# Altium footprint library SamacSys.PcbLib: 1008 footprints (part 7 of 63)
Each footprint in its own frame and in the unit in brackets; x right, y up, seen from the top. Pads: shape width x height; smd on the part's side, far side on the other; paste and mask are expansions set on the pad; w line width, h text height; cw(c..) or ccw(c..) is an arc to the next point about the centre after c.
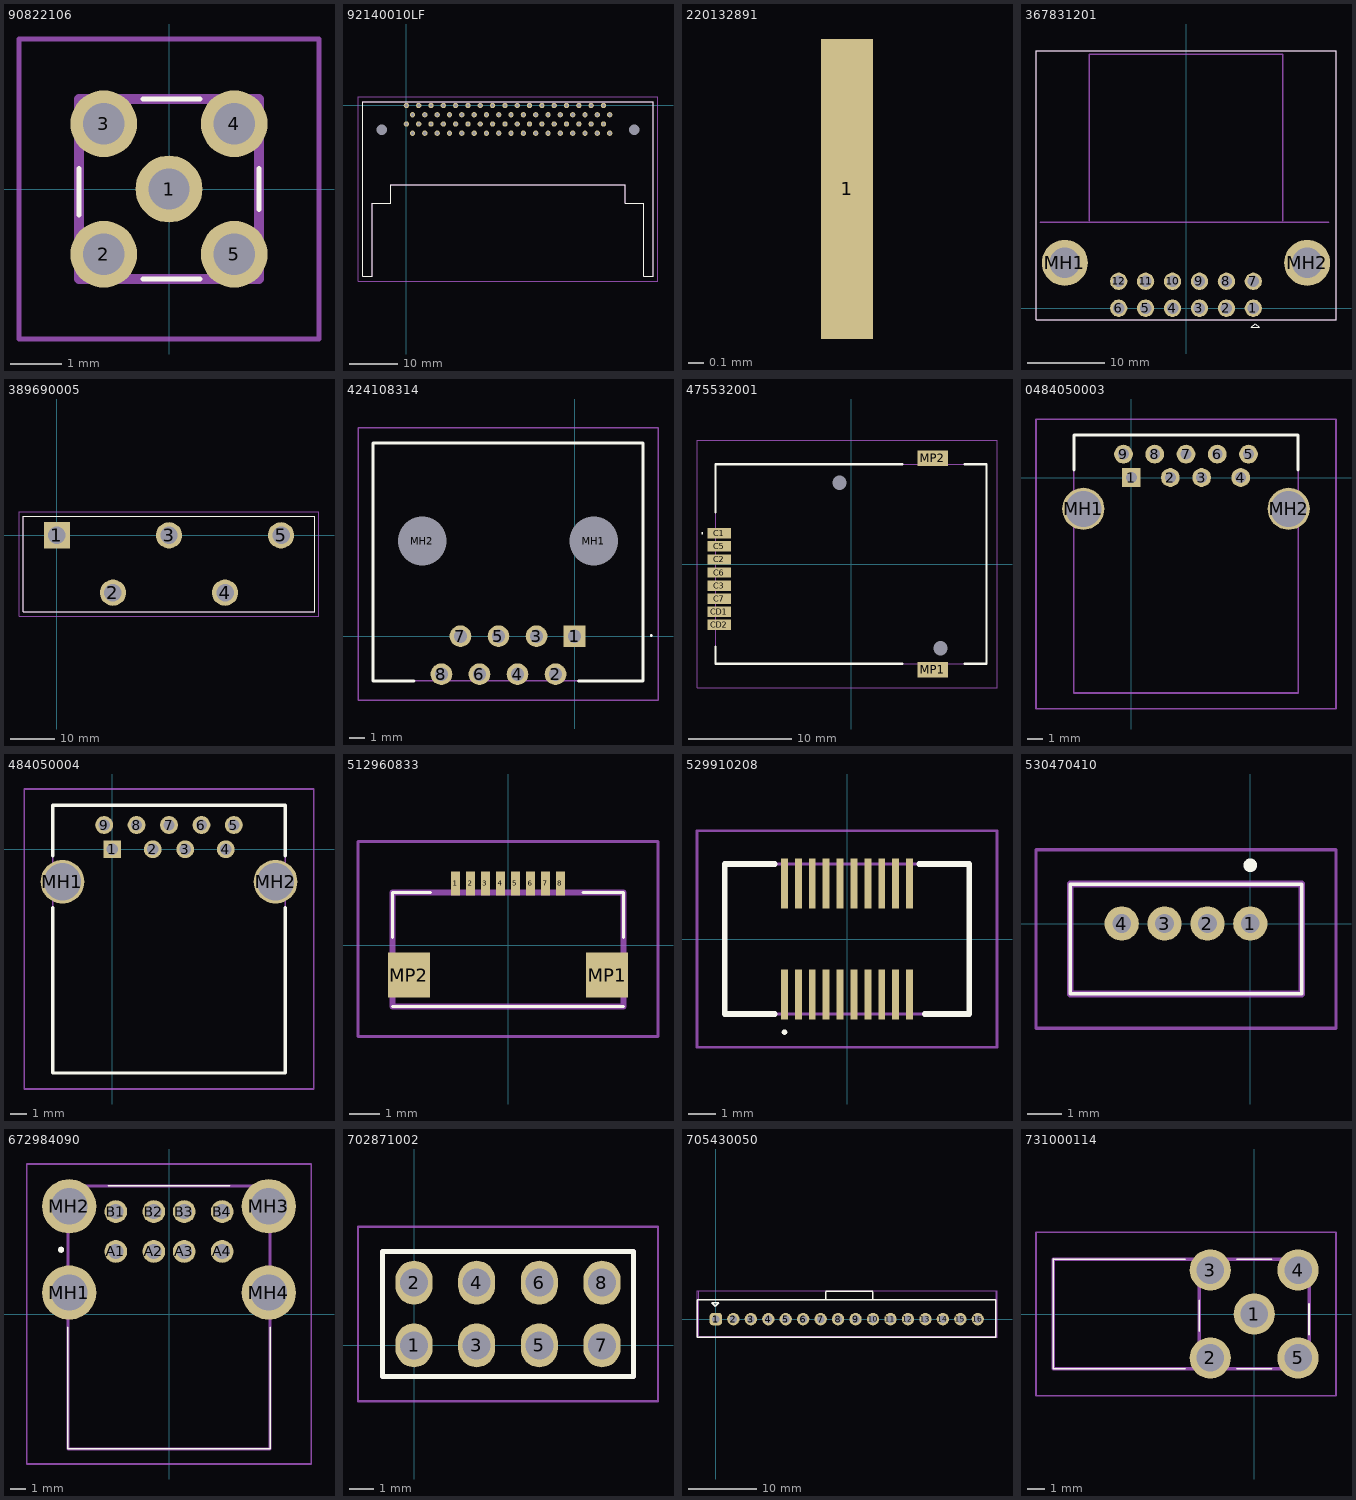
[diagram p6: the footprints below, top view; thin cyan lines are the x and y axes]

## 90822106 [mm]
pads (5):
  round 1.3 hole 0.8: 1(0,0) 2(-1.27,-1.27) 3(-1.27,1.27) 4(1.27,1.27) 5(1.27,-1.27)
Top Overlay:
  lines w0.1: -1.75,-0.5 -1.75,0.4 ; -0.5,-1.75 0.6,-1.75 ; -0.5,1.75 0.6,1.75 ; 1.75,-0.4 1.75,0.4
Assembly:
  lines w0.2: -1.75,-1.75 1.75,-1.75 1.75,1.75 -1.75,1.75 -1.75,-1.75
Countryard:
  lines w0.1: -2.92,-2.92 2.92,-2.92 2.92,2.92 -2.92,2.92 -2.92,-2.92
3D body "908-22106.stp": height 3.45, standoff -4, extent -1.75,-1.75 1.75,1.75

## 92140010LF [mm]
pads (70):
  round 1.1 hole 0.67: 1(0,0) 2(1.27,-1.906) 3(2.54,0) 4(3.81,-1.906) 5(5.08,0) 6(6.35,-1.906) 7(7.62,0) 8(8.89,-1.906) 9(10.16,0) 10(11.43,-1.906) 11(12.7,0) 12(13.97,-1.906) 13(15.24,0) 14(16.51,-1.906) 15(17.78,0) 16(19.05,-1.906) 17(20.32,0) 18(21.59,-1.906) 19(22.86,0) 20(24.13,-1.906) 21(25.4,0) 22(26.67,-1.906) 23(27.94,0) 24(29.21,-1.906) 25(30.48,0) 26(31.75,-1.906) 27(33.02,0) 28(34.29,-1.906) 29(35.56,0) 30(36.83,-1.906) 31(38.1,0) 32(39.37,-1.906) 33(40.64,0) 34(41.91,-1.906) 35(0,-3.81) 36(1.27,-5.715) 37(2.54,-3.81) 38(3.81,-5.715) 39(5.08,-3.81) 40(6.35,-5.715) 41(7.62,-3.81) 42(8.89,-5.715) 43(10.16,-3.81) 44(11.43,-5.715) 45(12.7,-3.81) 46(13.97,-5.715) 47(15.24,-3.81) 48(16.51,-5.715) 49(17.78,-3.81) 50(19.05,-5.715) 51(20.32,-3.81) 52(21.59,-5.715) 53(22.86,-3.81) 54(24.13,-5.715) 55(25.4,-3.81) 56(26.67,-5.715) 57(27.94,-3.81) 58(29.21,-5.715) 59(30.48,-3.81) 60(31.75,-5.715) 61(33.02,-3.81) 62(34.29,-5.715) 63(35.56,-3.81) 64(36.83,-5.715) 65(38.1,-3.81) 66(39.37,-5.715) 67(40.64,-3.81) 68(41.91,-5.715)
  round 1.1 hole 2.2 unplated: MH1(46.99,-5.015) MH2(-5.08,-5.015)
Top Overlay:
  lines w0.1: -8.97,-35.215 -6.985,-35.215 -6.985,-20.17 -3.175,-20.17 -3.175,-16.36 45.085,-16.36 45.085,-20.17 48.895,-20.17 48.895,-35.215 50.88,-35.215 50.88,0.785 -8.97,0.785 -8.97,-35.215
Assembly:
  lines w0.2: -8.97,-35.215 -6.985,-35.215 -6.985,-20.17 -3.175,-20.17 -3.175,-16.36 45.085,-16.36 45.085,-20.17 48.895,-20.17 48.895,-35.215 50.88,-35.215 50.88,0.785 -8.97,0.785 -8.97,-35.215
Countryard:
  lines w0.1: -9.97,-36.215 51.88,-36.215 51.88,1.785 -9.97,1.785 -9.97,-36.215
3D body "92140-010LF.stp": height 9.14, standoff -3.46, extent -9.14,-35.32 51.06,0.895

## 220132891 [mm]
pads (1):
  rect 0.35x2 smd: 1(-31.65,-12.35)

## 367831201 [mm]
pads (14):
  round 2.25 hole 1.5: 1(8.75,0) 2(5.25,0) 3(1.75,0) 4(-1.75,0) 5(-5.25,0) 6(-8.75,0) 7(8.75,3.5) 8(5.25,3.5) 9(1.75,3.5) 10(-1.75,3.5) 11(-5.25,3.5) 12(-8.75,3.5)
  round 6 hole 4: MH1(-15.75,5.9) MH2(15.75,5.9)
Top Overlay:
  lines w0.1: -19.5,-1.5 -19.5,33.5 19.5,33.5 19.5,-1.5 -19.5,-1.5 ; 8.5,-2.5 9.5,-2.5 9,-2 8.5,-2.5
Assembly:
  lines w0.2: -18.925,11.2 18.575,11.2 ; -12.6,11.4 -12.6,33 12.6,33 12.6,11.4
Countryard:
  lines w0.1: -19.5,-1.5 -19.5,33.5 19.5,33.5 19.5,-1.5 -19.5,-1.5
3D body "36783-1201.stp": height 24.58, standoff -3.04, extent -18.714,-0.294 18.644,32.163

## 389690005 [mm]
pads (5):
  rect 5.94x5.94 hole 3.96: 1(0,0)
  round 5.94 hole 3.96: 2(12.7,-13) 3(25.4,0) 4(38.1,-13) 5(50.8,0)
Top Overlay:
  lines w0.2: -7.6,-17.3 58.4,-17.3 58.4,4.3 -7.6,4.3 -7.6,-17.3
Assembly:
  lines w0.1: -7.6,-17.3 58.4,-17.3 58.4,4.3 -7.6,4.3 -7.6,-17.3
Countryard:
  lines w0.1: -8.6,-18.3 59.4,-18.3 59.4,5.3 -8.6,5.3 -8.6,-18.3
3D body "38969-0005.stp": height 22.58, standoff -4.09, extent -7.71,-18.72 58.33,2.87

## 424108314 [mm]
pads (10):
  rect 1.446x1.446 hole 0.89: 1(0,0)
  round 1.446 hole 0.89: 2(-1.27,-2.54) 3(-2.54,0) 4(-3.81,-2.54) 5(-5.08,0) 6(-6.35,-2.54) 7(-7.62,0) 8(-8.89,-2.54)
  round 1.625 hole 3.25 unplated: MH1(1.27,6.35) MH2(-10.16,6.35)
Top Overlay:
  lines w0.1: 5.07,0.05 ccw(c5.12,0.05) 5.17,0.05 ccw(c5.12,0.05) 5.07,0.05
  lines w0.2: -10.73,-2.98 -13.46,-2.98 -13.46,12.9 4.57,12.9 4.57,-2.98 0.27,-2.98
Assembly:
  lines w0.1: -13.46,-2.98 -13.46,12.9 4.57,12.9 4.57,-2.98 -13.46,-2.98
Countryard:
  lines w0.1: -14.46,-4.263 -14.46,13.9 5.57,13.9 5.57,-4.263 -14.46,-4.263
3D body "42410-8314.stp": height 16.26, standoff -3.37, extent -12.247,-2.937 3.247,12.937

## 475532001 [mm]
pads (12):
  rect 2.3x1 smd: C1(-12.8,2.985) C2(-12.8,0.445) C3(-12.8,-2.095) C5(-12.8,1.715) C6(-12.8,-0.825) C7(-12.8,-3.365) CD1(-12.8,-4.635) CD2(-12.8,-5.905)
  round 0.7 hole 1.4 unplated: MH1(8.67,-8.165) MH2(-1.13,7.885)
  rect 2.95x1.5 smd: MP1(7.9,-10.275) MP2(7.9,10.275)
Top Overlay:
  lines w0.1: -14.5,2.985 ccw(c-14.45,2.985) -14.4,2.985 ccw(c-14.45,2.985) -14.5,2.985
  lines w0.2: -13.15,-8 -13.15,-9.675 5,-9.675 ; -13.15,5 -13.15,9.675 5,9.675 ; 11,-9.675 13.15,-9.675 13.15,9.675 11,9.675
Assembly:
  lines w0.1: -13.15,-9.675 -13.15,9.675 13.15,9.675 13.15,-9.675 -13.15,-9.675
Countryard:
  lines w0.1: -14.95,-12.025 -14.95,12.025 14.15,12.025 14.15,-12.025 -14.95,-12.025
3D body "47553-2001.stp": height 1.9, standoff -0.6, extent -13.358,-10.388 13.142,10.562

## 0484050003 [mm]
pads (11):
  rect 1.2x1.2 hole 0.7: 1(0,0)
  round 1.2 hole 0.7: 2(2.5,0) 3(4.5,0) 4(7,0) 5(7.5,1.5) 6(5.5,1.5) 7(3.5,1.5) 8(1.5,1.5) 9(-0.5,1.5)
  round 2.7 hole 2.3: MH1(-3.07,-2) MH2(10.07,-2)
Top Overlay:
  lines w0.2: -3.675,0.5 -3.675,2.72 10.675,2.72 10.675,0.5
Assembly:
  lines w0.1: -3.675,-13.78 -3.675,2.72 10.675,2.72 10.675,-13.78 -3.675,-13.78
Countryard:
  lines w0.1: -6.095,-14.78 -6.095,3.72 13.095,3.72 13.095,-14.78 -6.095,-14.78
3D body "484050003.stp": height 7.57, standoff -4.04, extent -4.3,-13.8 11.3,2.7

## 484050004 [mm]
pads (11):
  rect 1.1x1.1 hole 0.7: 1(0,0)
  round 1.1 hole 0.7: 2(2.5,0) 3(4.5,0) 4(7,0) 5(7.5,1.5) 6(5.5,1.5) 7(3.5,1.5) 8(1.5,1.5) 9(-0.5,1.5)
  round 2.7 hole 2.3: MH1(-3.07,-2) MH2(10.07,-2)
Top Overlay:
  lines w0.2: -3.675,-3.6 -3.675,-13.78 10.675,-13.8 10.675,-3.6 ; -3.675,-0.4 -3.675,2.72 10.675,2.72 10.675,-0.4
Assembly:
  lines w0.1: -3.675,-13.78 10.675,-13.78 10.675,2.72 -3.675,2.72 -3.675,-13.78
Countryard:
  lines w0.1: -5.42,-14.78 12.42,-14.78 12.42,3.72 -5.42,3.72 -5.42,-14.78
3D body "48405-0004.stp": height 7.5, standoff -4.11, extent -4.3,-13.78 11.3,2.72

## 512960833 [mm]
pads (10):
  rect 0.3x0.8 smd: 1(-1.75,2.05) 2(-1.25,2.05) 3(-0.75,2.05) 4(-0.25,2.05) 5(0.25,2.05) 6(0.75,2.05) 7(1.25,2.05) 8(1.75,2.05)
  rect 1.4x1.5 smd: MP1(3.3,-1) MP2(-3.3,-1)
Top Overlay:
  lines w0.1: -3.85,-2.05 3.85,-2.05 ; -3.85,0.25 -3.85,1.75 -2.588,1.75 ; 2.5,1.75 3.85,1.75 3.85,0.25
Assembly:
  lines w0.2: -3.85,-2.05 3.85,-2.05 3.85,1.75 -3.85,1.75 -3.85,-2.05
Countryard:
  lines w0.1: -5,-3.05 5,-3.05 5,3.45 -5,3.45 -5,-3.05
3D body "51296-0833.stp": height 1.6, standoff 0, extent -3.86,-2.05 3.86,2.42

## 529910208 [mm]
pads (20):
  rect 0.25x1.8 smd: 1(-2.25,-2) 2(-2.25,2) 3(-1.75,-2) 4(-1.75,2) 5(-1.25,-2) 6(-1.25,2) 7(-0.75,-2) 8(-0.75,2) 9(-0.25,-2) 10(-0.25,2) 11(0.25,-2) 12(0.25,2) 13(0.75,-2) 14(0.75,2) 15(1.25,-2) 16(1.25,2) 17(1.75,-2) 18(1.75,2) 19(2.25,-2) 20(2.25,2)
Top Overlay:
  lines w0.1: -2.25,-3.4 cw(c-2.25,-3.35) -2.25,-3.3 cw(c-2.25,-3.35) -2.25,-3.4
  lines w0.2: -2.6,-2.7 -4.4,-2.7 -4.4,2.7 -2.6,2.7 ; 2.6,2.7 4.4,2.7 4.4,-2.7 2.8,-2.7
Assembly:
  lines w0.1: -4.4,-2.7 -4.4,2.7 4.4,2.7 4.4,-2.7 -4.4,-2.7
Countryard:
  lines w0.1: -5.4,-3.9 -5.4,3.9 5.4,3.9 5.4,-3.9 -5.4,-3.9
3D body "52991-0208.stp": height 2.3, standoff 0.01, extent -4.4,-2.7 4.4,2.7

## 530470410 [mm]
pads (4):
  round 1 hole 0.55: 1(0,0) 2(-1.25,0) 3(-2.5,0) 4(-3.75,0)
Top Overlay:
  lines w0.1: -5.25,-2.05 1.5,-2.05 1.5,1.15 -5.25,1.15 -5.25,-2.05
  lines w0.2: -0.1,1.7 cw(c0,1.7) 0.1,1.7 cw(c0,1.7) -0.1,1.7
Assembly:
  lines w0.2: -5.25,-2.05 1.5,-2.05 1.5,1.15 -5.25,1.15 -5.25,-2.05
Countryard:
  lines w0.1: -6.25,-3.05 2.5,-3.05 2.5,2.15 -6.25,2.15 -6.25,-3.05
3D body "53047-0410.stp": height 4.2, standoff -2.3, extent -5.255,-2.05 1.495,1.15

## 672984090 [mm]
pads (12):
  round 1.5 hole 1: A1(-3.5,4.117) A2(-1,4.117) A3(1,4.117) A4(3.5,4.117) B1(-3.5,6.737) B2(-1,6.737) B3(1,6.737) B4(3.5,6.737)
  round 3.57 hole 2.38: MH1(-6.57,1.407) MH2(-6.57,7.087) MH3(6.57,7.087) MH4(6.57,1.407)
Top Overlay:
  lines w0.1: -6.65,-0.872 -6.65,-8.872 6.65,-8.872 6.65,-0.872 ; -4,8.428 4,8.428
  lines w0.2: -7.1,4.128 ccw(c-7.1,4.228) -7.1,4.328 ccw(c-7.1,4.228) -7.1,4.128
Assembly:
  lines w0.2: -6.65,-8.872 6.65,-8.872 6.65,8.428 -6.65,8.428 -6.65,-8.872
Countryard:
  lines w0.1: -9.355,-9.872 9.355,-9.872 9.355,9.872 -9.355,9.872 -9.355,-9.872
3D body "67298-4090.stp": height 15.84, standoff -3.32, extent -7.662,-9.77 7.662,8.09

## 702871002 [mm]
pads (8):
  oval 1.5x1.785 hole 1.14: 1(0,0) 2(0,2.54) 3(2.54,0) 4(2.54,2.54) 5(5.08,0) 6(5.08,2.54) 7(7.62,0) 8(7.62,2.54)
Top Overlay:
  lines w0.2: -1.27,-1.27 -1.27,3.81 8.89,3.81 8.89,-1.27 -1.27,-1.27
Assembly:
  lines w0.2: -1.27,-1.27 -1.27,3.81 8.89,3.81 8.89,-1.27 -1.27,-1.27
Countryard:
  lines w0.1: -2.27,-2.27 -2.27,4.81 9.89,4.81 9.89,-2.27 -2.27,-2.27
3D body "70287-1002.stp": height 8.24, standoff -3.32, extent -1.27,-1.27 8.89,3.81

## 705430050 [mm]
height 14
pads (16):
  rrect50% 1.8x1.8 hole 1.1: 1(0,0)
  round 1.8 hole 1.1: 2(2.54,0) 3(5.08,0) 4(7.62,0) 5(10.16,0) 6(12.7,0) 7(15.24,0) 8(17.78,0) 9(20.32,0) 10(22.86,0) 11(25.4,0) 12(27.94,0) 13(30.48,0) 14(33.02,0) 15(35.56,0) 16(38.1,0)
Top Overlay:
  lines w0.2: 16,2.8 16,4 ; 16,4.064 22.8,4.064 ; 22.8,2.8 22.8,4 ; -2.7,-2.6 -2.7,2.8 40.7,2.8 40.7,-2.6 -2.7,-2.6 ; -0.574,2.367 -0.074,1.867 0.426,2.367 -0.574,2.367
Assembly:
  lines w0.15: -2.5,-2.5 -2.5,4.1 40.8,4.1 40.8,-2.5 -2.5,-2.5
Countryard:
  lines w0.1: -2.75,-2.6 40.9,-2.6 40.9,4.1 -2.75,4.1 -2.75,-2.6
3D body "705430050.stp": height 11.81, standoff -3.3, extent -2.5,-2.5 40.68,4.104

## 731000114 [mm]
pads (5):
  round 2.385 hole 1.59: 1(0,0) 2(-2.54,-2.54) 3(-2.54,2.54) 4(2.54,2.54) 5(2.54,-2.54)
Top Overlay:
  lines w0.1: -11.625,3.2 -11.625,-3 -11.625,-3.175 -4,-3.175 ; -11.6,3.175 -4,3.175 ; -3.175,-1 -3.175,0.8 ; -1,-3.175 1,-3.175 ; -1,3.175 1,3.175 ; 3.175,-1.2 3.175,0.6
Assembly:
  lines w0.2: -3.175,-3.175 -11.625,-3.175 -11.625,3.175 -3.175,3.175 ; -3.175,-3.175 -3.175,3.175 ; -3.175,-3.175 3.175,-3.175 3.175,3.175 -3.175,3.175
Countryard:
  lines w0.1: -12.625,-4.732 -12.625,4.732 4.732,4.732 4.732,-4.732 -12.625,-4.732
3D body "73100-0114.stp": height 9.57, standoff -3.93, extent -11.6,-3.175 3.2,3.175